# Altium footprint library BaseStation.PcbLib: 68 footprints (part 1 of 5)
Each footprint in its own frame and in the unit in brackets; x right, y up, seen from the top. Pads: shape width x height; smd on the part's side, far side on the other; paste and mask are expansions set on the pad; w line width, h text height; cw(c..) or ccw(c..) is an arc to the next point about the centre after c.
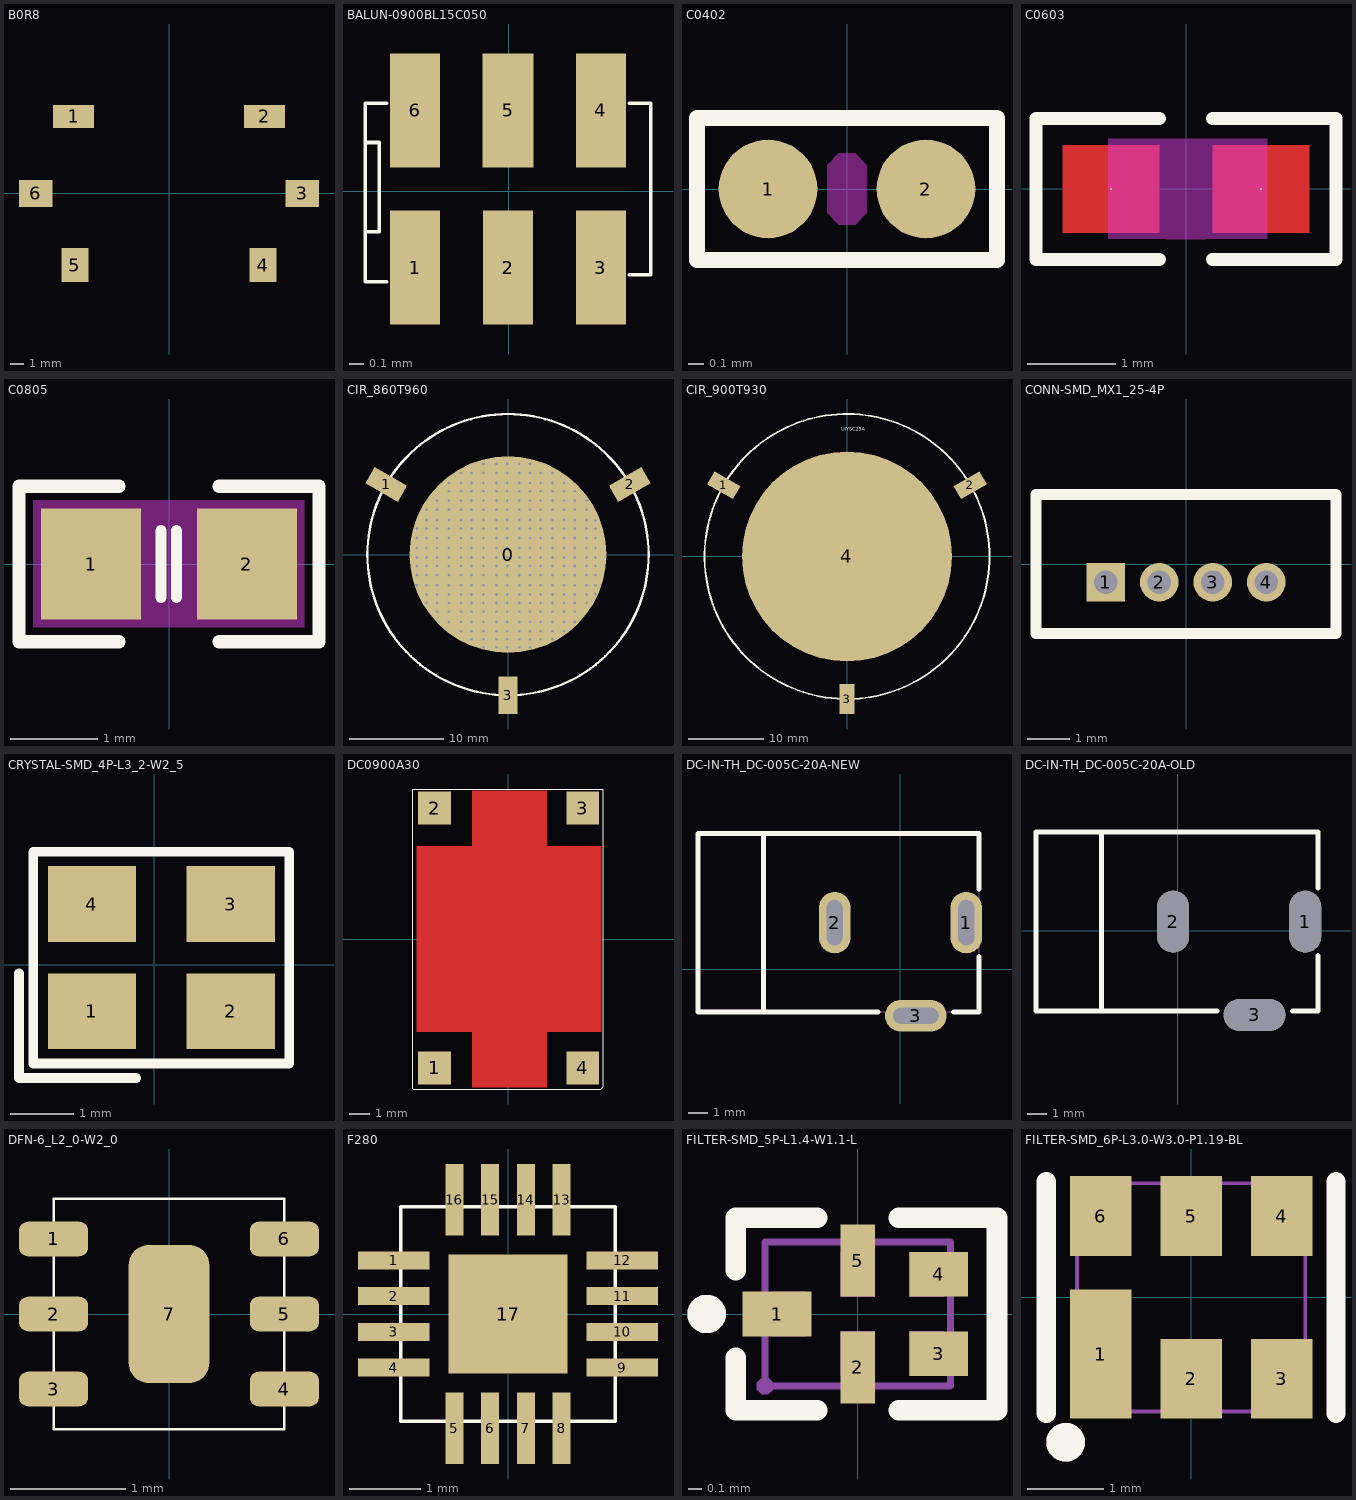
[diagram p0: the footprints below, top view; thin cyan lines are the x and y axes]

## B0R8 [mm]
pads (6):
  rect 3x1.7 smd: 1(-7,5.65) 2(7,5.65)
  rect 2.44x1.98 smd: 3(9.78,0) 6(-9.78,0)
  rect 1.98x2.49 smd: 4(6.895,-5.255) 5(-6.895,-5.255)

## BALUN-0900BL15C050 [mil] "BALUN-0900BL15C050"
pads (6):
  rect 13.78x31.5 smd: 1(-25.84,-20.98) 2(-0.25,-20.98) 3(25.34,-20.98) 4(25.34,22.32) 6(-25.84,22.32)
  rect 14.17x31.5 smd: 5(-0.25,22.32)
Top Overlay:
  lines w1: -33.71,-24.93 -38.63,-24.93 -39.62,-24.93 -39.62,24.28 -33.72,24.28 ; 33.22,-22.96 39.12,-22.96 39.12,24.28 33.22,24.28 ; -39.63,-11.15 -39.63,13.46 -35.69,13.46 -35.69,-11.15 -39.63,-11.15

## C0402 [mil] "C0402"
pads (2):
  round 25 smd: 1(-20,0) 2(20,0)
Top Layer keep-out:
  region: 5,4 5,-4 5,-6.07 2.07,-9 -2.07,-9 -5,-6.07 -5,-4 -5,4 -5,6.07 -2.07,9 2.07,9 5,6.07
Top Overlay:
  lines w4: -38,-18 -38,18 0,18 38,18 38,-18 -38,-18

## C0603 [mil] "C0603"
pads (2):
  round 1 smd: 1(-33.5,0) 2(33.5,0)
Top Layer:
  region: -12,19.5 -55,19.5 -55,-19.5 -12,-19.5
  region: 55,19.5 12,19.5 12,-19.5 55,-19.5
Top Layer keep-out:
  region: -8.71,22.4 -8.71,-22.4 8.7,-22.4 8.7,22.4
  region: -34.7,22.4 -34.7,-22.1 36.2,-22.1 36.2,22.4
Top Overlay:
  lines w5.9: -11.8,-31.5 -66.9,-31.5 -66.9,31.5 -11.8,31.5 ; 11.8,-31.5 66.89,-31.5 66.89,31.5 11.8,31.5

## C0805 [mil] "C0805"
pads (2):
  rect 45x50 smd: 1(-35,0) 2(35,0)
Top Layer keep-out:
  region: -61.05,28.65 -61.05,-28.5 60.95,-28.5 60.95,28.65
  region: 8,25 8,-25 -8,-25 -8,25
Top Overlay:
  lines w5: -3.55,-15 -3.55,15 ; 3.45,-15 3.45,15
  lines w6: -22.5,-35 -67.5,-35 -67.5,35 -22.5,35 ; 22.5,-35 67.5,-35 67.5,35 22.5,35

## CIR_860T960 [mm]
pads (4):
  round 21 smd: 0(0,0)
  rect 2x4 smd rot 60: 1(-12.977,7.492)
  rect 2x4 smd rot 120: 2(12.977,7.492)
  rect 2x4 smd: 3(0,-15)
via 9.34,-4.2 diameter 0.45 hole 0.3
via 9.32,3.64 diameter 0.45 hole 0.3
via 9.34,-2.18 diameter 0.45 hole 0.3
via 9.34,-3.26 diameter 0.45 hole 0.3
via 9.34,1.78 diameter 0.45 hole 0.3
via 9.34,0.7 diameter 0.45 hole 0.3
via 9.34,-0.3 diameter 0.45 hole 0.3
via 9.34,-1.2 diameter 0.45 hole 0.3
via 9.34,2.78 diameter 0.45 hole 0.3
via 5.98,7.65 diameter 0.45 hole 0.3
via 5.98,6.75 diameter 0.45 hole 0.3
via 7.12,6.75 diameter 0.45 hole 0.3
via 8.37,5.76 diameter 0.45 hole 0.3
via 8.37,4.78 diameter 0.45 hole 0.3
via 8.37,3.68 diameter 0.45 hole 0.3
via 8.37,2.78 diameter 0.45 hole 0.3
via 7.12,5.76 diameter 0.45 hole 0.3
via 7.12,4.78 diameter 0.45 hole 0.3
via 7.12,3.68 diameter 0.45 hole 0.3
via 7.12,2.78 diameter 0.45 hole 0.3
via 5.98,2.78 diameter 0.45 hole 0.3
via 5.98,3.68 diameter 0.45 hole 0.3
via 5.98,4.78 diameter 0.45 hole 0.3
via 5.98,5.76 diameter 0.45 hole 0.3
via 8.37,1.78 diameter 0.45 hole 0.3
via 8.37,0.7 diameter 0.45 hole 0.3
via 8.37,-0.3 diameter 0.45 hole 0.3
via 8.37,-1.2 diameter 0.45 hole 0.3
via 7.12,1.78 diameter 0.45 hole 0.3
via 7.12,0.7 diameter 0.45 hole 0.3
via 7.12,-0.3 diameter 0.45 hole 0.3
via 7.12,-1.2 diameter 0.45 hole 0.3
via 5.98,-1.2 diameter 0.45 hole 0.3
via 5.98,-0.3 diameter 0.45 hole 0.3
via 5.98,0.7 diameter 0.45 hole 0.3
via 5.98,1.78 diameter 0.45 hole 0.3
via 8.37,-2.18 diameter 0.45 hole 0.3
via 8.37,-3.26 diameter 0.45 hole 0.3
via 8.37,-4.26 diameter 0.45 hole 0.3
via 8.37,-5.16 diameter 0.45 hole 0.3
via 7.12,-2.18 diameter 0.45 hole 0.3
via 7.12,-3.26 diameter 0.45 hole 0.3
via 7.12,-4.26 diameter 0.45 hole 0.3
via 7.12,-5.16 diameter 0.45 hole 0.3
via 5.98,-5.16 diameter 0.45 hole 0.3
via 5.98,-4.26 diameter 0.45 hole 0.3
via 5.98,-3.26 diameter 0.45 hole 0.3
via 5.98,-2.18 diameter 0.45 hole 0.3
via 7.12,-6.1 diameter 0.45 hole 0.3
via 7.12,-7.18 diameter 0.45 hole 0.3
via 5.98,-8.18 diameter 0.45 hole 0.3
via 5.98,-7.18 diameter 0.45 hole 0.3
via 5.98,-6.1 diameter 0.45 hole 0.3
via 2.33,9.69 diameter 0.45 hole 0.3
via 2.33,8.71 diameter 0.45 hole 0.3
via 2.33,7.65 diameter 0.45 hole 0.3
via 2.33,6.75 diameter 0.45 hole 0.3
via 3.47,6.75 diameter 0.45 hole 0.3
via 3.47,7.65 diameter 0.45 hole 0.3
via 3.47,8.71 diameter 0.45 hole 0.3
via 4.74,6.75 diameter 0.45 hole 0.3
via 4.74,7.65 diameter 0.45 hole 0.3
via 4.74,8.71 diameter 0.45 hole 0.3
via 4.74,5.76 diameter 0.45 hole 0.3
via 4.74,4.78 diameter 0.45 hole 0.3
via 4.74,3.68 diameter 0.45 hole 0.3
via 4.74,2.78 diameter 0.45 hole 0.3
via 3.47,5.76 diameter 0.45 hole 0.3
via 3.47,4.78 diameter 0.45 hole 0.3
via 3.47,3.68 diameter 0.45 hole 0.3
via 3.47,2.78 diameter 0.45 hole 0.3
via 2.33,2.78 diameter 0.45 hole 0.3
via 2.33,3.68 diameter 0.45 hole 0.3
via 2.33,4.78 diameter 0.45 hole 0.3
via 2.33,5.76 diameter 0.45 hole 0.3
via 4.74,1.78 diameter 0.45 hole 0.3
via 4.74,0.7 diameter 0.45 hole 0.3
via 4.74,-0.3 diameter 0.45 hole 0.3
via 4.74,-1.2 diameter 0.45 hole 0.3
via 3.47,1.78 diameter 0.45 hole 0.3
via 3.47,0.7 diameter 0.45 hole 0.3
via 3.47,-0.3 diameter 0.45 hole 0.3
via 3.47,-1.2 diameter 0.45 hole 0.3
via 2.33,-1.2 diameter 0.45 hole 0.3
via 2.33,-0.3 diameter 0.45 hole 0.3
via 2.33,0.7 diameter 0.45 hole 0.3
via 2.33,1.78 diameter 0.45 hole 0.3
via 4.74,-2.18 diameter 0.45 hole 0.3
via 4.74,-3.26 diameter 0.45 hole 0.3
via 4.74,-4.26 diameter 0.45 hole 0.3
via 4.74,-5.16 diameter 0.45 hole 0.3
via 3.47,-2.18 diameter 0.45 hole 0.3
via 3.47,-3.26 diameter 0.45 hole 0.3
via 3.47,-4.26 diameter 0.45 hole 0.3
via 3.47,-5.16 diameter 0.45 hole 0.3
via 2.33,-5.16 diameter 0.45 hole 0.3
via 2.33,-4.26 diameter 0.45 hole 0.3
via 2.33,-3.26 diameter 0.45 hole 0.3
via 2.33,-2.18 diameter 0.45 hole 0.3
via 4.74,-6.1 diameter 0.45 hole 0.3
via 4.74,-7.18 diameter 0.45 hole 0.3
via 4.74,-8.18 diameter 0.45 hole 0.3
via 4.74,-9.02 diameter 0.45 hole 0.3
via 3.47,-6.1 diameter 0.45 hole 0.3
via 3.47,-7.18 diameter 0.45 hole 0.3
via 3.47,-8.18 diameter 0.45 hole 0.3
via 3.47,-9.02 diameter 0.45 hole 0.3
via 2.33,-9.02 diameter 0.45 hole 0.3
via 2.33,-8.18 diameter 0.45 hole 0.3
via 2.33,-7.18 diameter 0.45 hole 0.3
via 2.33,-6.1 diameter 0.45 hole 0.3
via 2.33,-9.88 diameter 0.45 hole 0.3
via -9.71,2.78 diameter 0.45 hole 0.3
via -9.71,-1.2 diameter 0.45 hole 0.3
via -9.71,-0.3 diameter 0.45 hole 0.3
via -9.71,0.7 diameter 0.45 hole 0.3
via -9.71,1.78 diameter 0.45 hole 0.3
via -9.71,-3.26 diameter 0.45 hole 0.3
via -9.71,-2.18 diameter 0.45 hole 0.3
via -7.56,-6.1 diameter 0.45 hole 0.3
via -6.29,-7.18 diameter 0.45 hole 0.3
via -6.29,-6.1 diameter 0.45 hole 0.3
via -8.7,-2.18 diameter 0.45 hole 0.3
via -8.7,-3.26 diameter 0.45 hole 0.3
via -8.7,-4.26 diameter 0.45 hole 0.3
via -8.7,-5.16 diameter 0.45 hole 0.3
via -7.56,-5.16 diameter 0.45 hole 0.3
via -7.56,-4.26 diameter 0.45 hole 0.3
via -7.56,-3.26 diameter 0.45 hole 0.3
via -7.56,-2.18 diameter 0.45 hole 0.3
via -6.29,-5.16 diameter 0.45 hole 0.3
via -6.29,-4.26 diameter 0.45 hole 0.3
via -6.29,-3.26 diameter 0.45 hole 0.3
via -6.29,-2.18 diameter 0.45 hole 0.3
via -8.7,1.78 diameter 0.45 hole 0.3
via -8.7,0.7 diameter 0.45 hole 0.3
via -8.7,-0.3 diameter 0.45 hole 0.3
via -8.7,-1.2 diameter 0.45 hole 0.3
via -7.56,-1.2 diameter 0.45 hole 0.3
via -7.56,-0.3 diameter 0.45 hole 0.3
via -7.56,0.7 diameter 0.45 hole 0.3
via -7.56,1.78 diameter 0.45 hole 0.3
via -6.29,-1.2 diameter 0.45 hole 0.3
via -6.29,-0.3 diameter 0.45 hole 0.3
via -6.29,0.7 diameter 0.45 hole 0.3
via -6.29,1.78 diameter 0.45 hole 0.3
via -8.7,4.78 diameter 0.45 hole 0.3
via -8.7,3.68 diameter 0.45 hole 0.3
via -8.7,2.78 diameter 0.45 hole 0.3
via -7.56,2.78 diameter 0.45 hole 0.3
via -7.56,3.68 diameter 0.45 hole 0.3
via -7.56,4.78 diameter 0.45 hole 0.3
via -7.56,5.76 diameter 0.45 hole 0.3
via -6.29,2.78 diameter 0.45 hole 0.3
via -6.29,3.68 diameter 0.45 hole 0.3
via -6.29,4.78 diameter 0.45 hole 0.3
via -6.29,5.76 diameter 0.45 hole 0.3
via -6.29,7.65 diameter 0.45 hole 0.3
via -6.29,6.75 diameter 0.45 hole 0.3
via -5.02,8.71 diameter 0.45 hole 0.3
via -5.02,7.65 diameter 0.45 hole 0.3
via -5.02,6.75 diameter 0.45 hole 0.3
via -3.88,6.75 diameter 0.45 hole 0.3
via -3.88,7.65 diameter 0.45 hole 0.3
via -3.88,8.71 diameter 0.45 hole 0.3
via -2.61,6.75 diameter 0.45 hole 0.3
via -2.61,7.65 diameter 0.45 hole 0.3
via -2.61,8.71 diameter 0.45 hole 0.3
via -2.61,9.69 diameter 0.45 hole 0.3
via -2.61,5.76 diameter 0.45 hole 0.3
via -2.61,4.78 diameter 0.45 hole 0.3
via -2.61,3.68 diameter 0.45 hole 0.3
via -2.61,2.78 diameter 0.45 hole 0.3
via -3.88,5.76 diameter 0.45 hole 0.3
via -3.88,4.78 diameter 0.45 hole 0.3
via -3.88,3.68 diameter 0.45 hole 0.3
via -3.88,2.78 diameter 0.45 hole 0.3
via -5.02,2.78 diameter 0.45 hole 0.3
via -5.02,3.68 diameter 0.45 hole 0.3
via -5.02,4.78 diameter 0.45 hole 0.3
via -5.02,5.76 diameter 0.45 hole 0.3
via -2.61,1.78 diameter 0.45 hole 0.3
via -2.61,0.7 diameter 0.45 hole 0.3
via -2.61,-0.3 diameter 0.45 hole 0.3
via -2.61,-1.2 diameter 0.45 hole 0.3
via -3.88,1.78 diameter 0.45 hole 0.3
via -3.88,0.7 diameter 0.45 hole 0.3
via -3.88,-0.3 diameter 0.45 hole 0.3
via -3.88,-1.2 diameter 0.45 hole 0.3
via -5.02,-1.2 diameter 0.45 hole 0.3
via -5.02,-0.3 diameter 0.45 hole 0.3
via -5.02,0.7 diameter 0.45 hole 0.3
via -5.02,1.78 diameter 0.45 hole 0.3
via -2.61,-2.18 diameter 0.45 hole 0.3
via -2.61,-3.26 diameter 0.45 hole 0.3
via -2.61,-4.26 diameter 0.45 hole 0.3
via -2.61,-5.16 diameter 0.45 hole 0.3
via -3.88,-2.18 diameter 0.45 hole 0.3
via -3.88,-3.26 diameter 0.45 hole 0.3
via -3.88,-4.26 diameter 0.45 hole 0.3
via -3.88,-5.16 diameter 0.45 hole 0.3
via -5.02,-5.16 diameter 0.45 hole 0.3
via -5.02,-4.26 diameter 0.45 hole 0.3
via -5.02,-3.26 diameter 0.45 hole 0.3
via -5.02,-2.18 diameter 0.45 hole 0.3
via -2.61,-6.1 diameter 0.45 hole 0.3
via -2.61,-7.18 diameter 0.45 hole 0.3
via -2.61,-8.18 diameter 0.45 hole 0.3
via -2.61,-9.02 diameter 0.45 hole 0.3
via -3.88,-6.1 diameter 0.45 hole 0.3
via -3.88,-7.18 diameter 0.45 hole 0.3
via -3.88,-8.18 diameter 0.45 hole 0.3
via -3.88,-9.02 diameter 0.45 hole 0.3
via -5.02,-8.18 diameter 0.45 hole 0.3
via -5.02,-7.18 diameter 0.45 hole 0.3
via -5.02,-6.1 diameter 0.45 hole 0.3
via -2.61,-9.88 diameter 0.45 hole 0.3
via 1.19,-9.88 diameter 0.45 hole 0.3
via -0.08,-9.88 diameter 0.45 hole 0.3
via -1.22,-9.88 diameter 0.45 hole 0.3
via -1.22,-6.1 diameter 0.45 hole 0.3
via -1.22,-7.18 diameter 0.45 hole 0.3
via -1.22,-8.18 diameter 0.45 hole 0.3
via -1.22,-9.02 diameter 0.45 hole 0.3
via -0.08,-9.02 diameter 0.45 hole 0.3
via -0.08,-8.18 diameter 0.45 hole 0.3
via -0.08,-7.18 diameter 0.45 hole 0.3
via -0.08,-6.1 diameter 0.45 hole 0.3
via 1.19,-9.02 diameter 0.45 hole 0.3
via 1.19,-8.18 diameter 0.45 hole 0.3
via 1.19,-7.18 diameter 0.45 hole 0.3
via 1.19,-6.1 diameter 0.45 hole 0.3
via -1.22,-2.18 diameter 0.45 hole 0.3
via -1.22,-3.26 diameter 0.45 hole 0.3
via -1.22,-4.26 diameter 0.45 hole 0.3
via -1.22,-5.16 diameter 0.45 hole 0.3
via -0.08,-5.16 diameter 0.45 hole 0.3
via -0.08,-4.26 diameter 0.45 hole 0.3
via -0.08,-3.26 diameter 0.45 hole 0.3
via -0.08,-2.18 diameter 0.45 hole 0.3
via 1.19,-5.16 diameter 0.45 hole 0.3
via 1.19,-4.26 diameter 0.45 hole 0.3
via 1.19,-3.26 diameter 0.45 hole 0.3
via 1.19,-2.18 diameter 0.45 hole 0.3
via -1.22,1.78 diameter 0.45 hole 0.3
via -1.22,0.7 diameter 0.45 hole 0.3
via -1.22,-0.3 diameter 0.45 hole 0.3
via -1.22,-1.2 diameter 0.45 hole 0.3
via -0.08,-1.2 diameter 0.45 hole 0.3
via -0.08,-0.3 diameter 0.45 hole 0.3
via -0.08,0.7 diameter 0.45 hole 0.3
via -0.08,1.78 diameter 0.45 hole 0.3
via 1.19,-1.2 diameter 0.45 hole 0.3
via 1.19,-0.3 diameter 0.45 hole 0.3
via 1.19,0.7 diameter 0.45 hole 0.3
via 1.19,1.78 diameter 0.45 hole 0.3
via -1.22,5.76 diameter 0.45 hole 0.3
via -1.22,4.78 diameter 0.45 hole 0.3
via -1.22,3.68 diameter 0.45 hole 0.3
via -1.22,2.78 diameter 0.45 hole 0.3
via -0.08,2.78 diameter 0.45 hole 0.3
via -0.08,3.68 diameter 0.45 hole 0.3
via -0.08,4.78 diameter 0.45 hole 0.3
via -0.08,5.76 diameter 0.45 hole 0.3
via 1.19,2.78 diameter 0.45 hole 0.3
via 1.19,3.68 diameter 0.45 hole 0.3
via 1.19,4.78 diameter 0.45 hole 0.3
via 1.19,5.76 diameter 0.45 hole 0.3
via 1.19,9.69 diameter 0.45 hole 0.3
via 1.19,8.71 diameter 0.45 hole 0.3
via 1.19,7.65 diameter 0.45 hole 0.3
via 1.19,6.75 diameter 0.45 hole 0.3
via -0.08,9.69 diameter 0.45 hole 0.3
via -0.08,8.71 diameter 0.45 hole 0.3
via -0.08,7.65 diameter 0.45 hole 0.3
via -0.08,6.75 diameter 0.45 hole 0.3
via -1.22,6.75 diameter 0.45 hole 0.3
via -1.22,7.65 diameter 0.45 hole 0.3
via -1.22,8.71 diameter 0.45 hole 0.3
via -1.22,9.69 diameter 0.45 hole 0.3
Top Overlay:
  circle w0.254: c0,0 r15

## CIR_900T930 [mm] "CIRCULATOR"
pads (4):
  rect 2x4 smd rot 60: 1(-16.435,9.489)
  rect 2x4 smd rot 120: 2(16.427,9.492)
  rect 2x4 smd: 3(0.002,-19.003)
  round 28 smd mask+0: 4(-0.01,0)
Top Overlay:
  circle w0.254: c-0.01,0 r19
  text "UIYSC25A" at -0.8,16.738 h0.51

## CONN-SMD_MX1_25-4P [mm] "CONN-SMD_MX1_25-4P"
pads (4):
  rect 0.9x0.9 hole 0.55: 1(-1.875,-0.425)
  round 0.9 hole 0.55: 2(-0.625,-0.425) 3(0.625,-0.425) 4(1.875,-0.425)
Top Overlay:
  lines w0.254: -3.5,0.875 -3.5,1.625 3.5,1.625 3.5,-1.625 -3.5,-1.625 -3.5,0.925

## CRYSTAL-SMD_4P-L3_2-W2_5 [mm] "CRYSTAL-SMD_4P-L3_2-W2_5"
pads (4):
  rect 1.4x1.2 smd: 1(-0.986,-0.736) 2(1.214,-0.736) 3(1.214,0.964) 4(-0.986,0.964)
Top Overlay:
  lines w0.152: -2.143,-0.136 -2.143,-1.793 -0.286,-1.793 ; -1.914,-1.564 2.143,-1.564 2.143,1.793 -1.914,1.793 -1.914,-1.564

## DC0900A30 [mm] "DC0900A30"
pads (5):
  rect 1.6x1.6 smd: 1(-3.56,-6.265) 2(-3.56,6.355) 3(3.63,6.355) 4(3.63,-6.265)
  round 0.025 smd: 5(1.875,-7.195)
Top Layer:
  region: 1.875,-7.195 1.875,-4.495 4.525,-4.495 4.525,4.505 1.875,4.505 1.875,7.205 -1.725,7.205 -1.725,4.505 -4.425,4.505 -4.425,-4.495 -1.725,-4.495 -1.725,-7.195
  lines w0.54: 3.63,6.355 3.635,6.349
Top Overlay:
  lines w0.025: -4.615,6.405 -4.615,7.285 4.615,7.285 4.615,-7.185 4.515,-7.285 -4.595,-7.285 -4.615,-7.265 -4.615,6.415

## DC-IN-TH_DC-005C-20A-NEW [mm]
pads (3):
  oval 1.6x3.1 hole 0.8 slot 2.3 at 90 deg paste+0 mask+0.051: 1(3.325,2.35)
  oval 1.6x3.1 hole 0.8 slot 2.3 at 90 deg copper offset 0,0.001 paste+0 mask+0.051: 2(-3.324,2.35)
  oval 3.1x1.6 hole 0.8 slot 2.3 at 0 deg copper offset 0,-0.001 paste+0 mask+0.051: 3(0.775,-2.349)
Top Overlay:
  lines w0.254: -10.225,6.85 3.975,6.85 ; -10.225,-2.15 -10.225,6.85 ; -10.225,-2.149 -1.125,-2.15 ; -6.925,-2.146 -6.925,6.845 ; -6.923,-2.146 -6.923,6.845 ; 2.675,-2.15 3.975,-2.15 3.975,0.649 ; 3.975,4.05 3.975,6.849
Mechanical 6:
  region: -6.725,6.95 -10.225,6.95 -10.275,6.9 -10.275,-2.2 -10.225,-2.25 -6.825,-2.25 -6.825,-2.05 -10.125,-2.05 -10.125,6.75 -6.725,6.75
Mechanical 15:
  region: 4.035,6.875 4,6.91 3.95,6.91 3.915,6.875 3.915,6.825 3.95,6.79 4,6.79 4.035,6.825
  region: 3.175,1.85 3.175,2.85 3.475,2.85 3.475,1.85
  region: 0.275,-2.2 1.275,-2.2 1.275,-2.5 0.275,-2.5
  region: -3.45,1.85 -3.45,2.85 -3.2,2.85 -3.2,1.85
  region: -0.225,-2.5 1.775,-2.5 1.775,-2.1 -0.225,-2.1
  lines w0.051: -10.225,-2.15 -10.225,6.85 3.975,6.85 3.975,-2.15 -10.225,-2.15

## DC-IN-TH_DC-005C-20A-OLD [mm] "DC-IN-TH_DC-005C-20A"
pads (3):
  oval 1.6x3.1 hole 1.6 slot 3.1 at 90 deg: 1(6.414,0.462) 2(-0.236,0.462)
  oval 3.1x1.6 hole 1.6 slot 3.1 at 0 deg: 3(3.864,-4.237)
Top Overlay:
  lines w0.254: -7.137,4.962 7.063,4.962 ; -7.136,4.962 -7.136,-4.038 1.964,-4.038 ; -3.836,-4.034 -3.836,4.957 ; -3.835,-4.034 -3.835,4.957 ; 5.764,-4.038 7.064,-4.038 7.063,-1.239 ; 7.064,2.162 7.063,4.961

## DFN-6_L2_0-W2_0 [mm] "DFN-6_L2_0-W2_0"
pads (7):
  rrect50% 0.6x0.3 smd: 1(-1,0.65) 2(-1,0) 3(-1,-0.65) 4(1,-0.65) 5(1,0) 6(1,0.65)
  rrect50% 0.7x1.2 smd: 7(0,0)
Top Overlay:
  lines w0.02: -1,-1 -1,1 1,1 1,-1 -1,-1

## F280 [mm]
pads (17):
  rect 1x0.25 smd mask+0: 1(-1.6,0.75) 2(-1.6,0.25) 3(-1.6,-0.25) 4(-1.6,-0.75) 9(1.6,-0.75) 10(1.6,-0.25) 11(1.6,0.25) 12(1.6,0.75)
  rect 0.25x1 smd mask+0: 5(-0.75,-1.6) 6(-0.25,-1.6) 7(0.25,-1.6) 8(0.75,-1.6) 13(0.75,1.6) 14(0.25,1.6) 15(-0.25,1.6) 16(-0.75,1.6)
  rect 1.66x1.66 smd mask+0: 17(0,0)
Top Overlay:
  lines w0.05: -1.5,-1.5 1.5,-1.5 1.5,1.5 -1.5,1.5 -1.5,-1.5

## FILTER-SMD_5P-L1.4-W1.1-L [mm]
pads (5):
  rect 0.5x0.325 smd: 1(-0.588,0)
  rect 0.25x0.525 smd: 2(0,-0.388) 5(0,0.388)
  rect 0.425x0.325 smd: 3(0.587,-0.288) 4(0.587,0.288)
Top Overlay:
  circle w0.14: c-1.1,0 r0.07
  lines w0.15: -0.888,-0.318 -0.888,-0.7 -0.297,-0.7 ; -0.888,0.318 -0.888,0.7 -0.297,0.7 ; 0.297,-0.7 1.012,-0.7 1.012,0.7 0.297,0.7
Mechanical 2:
  circle w0.14: c-1.1,0 r0.07
Mechanical 6:
  lines w0.051: -0.675,-0.525 0.675,-0.525 0.675,0.525 -0.675,0.525 -0.675,-0.525
Mechanical 8:
  region: -0.615,-0.55 -0.65,-0.585 -0.7,-0.585 -0.735,-0.55 -0.735,-0.5 -0.7,-0.465 -0.65,-0.465 -0.615,-0.5
Mechanical 9:
  region: 0.625,0.126 0.375,0.126 0.375,0.451 0.625,0.451
  region: 0.625,-0.451 0.375,-0.451 0.375,-0.126 0.625,-0.126
  region: -0.125,0.451 0.125,0.451 0.125,0.126 -0.125,0.126
  region: -0.125,-0.125 0.125,-0.125 0.125,-0.45 -0.125,-0.45
  region: -0.375,0.163 -0.375,-0.162 -0.625,-0.162 -0.625,0.163

## FILTER-SMD_6P-L3.0-W3.0-P1.19-BL [mm]
pads (6):
  rect 0.81x1.7 smd: 1(-1.19,-0.745)
  rect 0.81x1.05 smd: 2(0,-1.07) 3(1.19,-1.07) 4(1.19,1.07) 5(0,1.07) 6(-1.19,1.07)
Top Overlay:
  circle w0.254: c-1.651,-1.905 r0.127
  lines w0.254: -1.905,-1.524 -1.905,1.524 ; 1.905,-1.524 1.905,1.524
Mechanical 2:
  circle w0.254: c-1.651,-1.905 r0.127
Mechanical 6:
  lines w0.051: -1.5,-1.5 1.5,-1.5 1.5,1.5 -1.5,1.5 -1.5,-1.5
Mechanical 8:
  region: -1.44,-1.525 -1.475,-1.56 -1.525,-1.56 -1.56,-1.525 -1.56,-1.475 -1.525,-1.44 -1.475,-1.44 -1.44,-1.475
Mechanical 9:
  region: -0.3,-0.645 0.3,-0.645 0.3,-1.495 -0.3,-1.495
  region: 0.89,-0.65 1.49,-0.65 1.49,-1.5 0.89,-1.5
  region: 0.89,1.495 1.49,1.495 1.49,0.645 0.89,0.645
  region: -0.3,1.495 0.3,1.495 0.3,0.645 -0.3,0.645
  region: -1.49,1.495 -0.89,1.495 -0.89,0.645 -1.49,0.645
  region: -1.49,0.005 -0.89,0.005 -0.89,-1.495 -1.49,-1.495